# Altium schematic symbol library HS20S010B.SCHLIB: 1 symbol
Pins are listed as number, name and electrical type; pins without a type are passive.

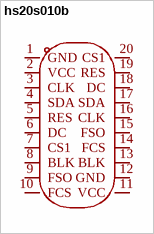
[diagram p0: symbol hs20s010b]

## hs20s010b
designator LCD??  (value not drawn)
核心芯片:ST7789;尺寸(inch):2;像素分辨率:320x240;; Manufacturer: HS(汉昇); AddInBom: yes; ModelId: 0121547e629f428887221e14eec3ec9e; ModelName: LCD-TH_HS20S010B; ModelTransform: 1425.194,2488.18384,0,0,0,0,0,0,0; Controller Type: ST7789; Symbol: HS20S010B; LCSC Part Name: 2.0寸240*320(RGB)彩色SPI串口TFT液晶显示屏; SupplierPart: C5329586; ManufacturerPart: HS20S010B; Supplier Footprint: -; JLCPCB Part Class: Extended Part; Datasheet: https://item.szlcsc.com/datasheet/HS20S010B/6087847.html; Supplier: LCSC; ConvertToPcb: yes; FootprintName: LCD-TH_HS20S010B; Size: 2; Dot Pixels: 320x240; Operating Temperature: -20℃~+70℃
footprint LCD-TH_HS20S010B
pins: 1 GND, 2 VCC, 3 CLK, 4 SDA, 5 RES, 6 DC, 7 CS1, 8 BLK, 9 FSO, 10 FCS, 11 VCC, 12 GND, 13 BLK, 14 FCS, 15 FSO, 16 CLK, 17 SDA, 18 DC, 19 RES, 20 CS1